# Altium schematic symbol library KF126-3P.SchLib: 1 symbol
Pins are listed as number, name and electrical type; pins without a type are passive.

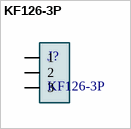
[diagram p0: symbol KF126-3P]

## KF126-3P
designator J?
TERM BLOCK 3POS SIDE ENTRY 5MM; MP: 282836-3; Price: None; Value: KF126-3P; Package: None; Availability: Unavailable
footprint KF126-3P
pins: 1, 2, 3